# Altium schematic symbol library Aquarium_ATO_PhysicalPin_V1_1.SchLib: 21 symbols
Pins are listed as number, name and electrical type; pins without a type are passive.

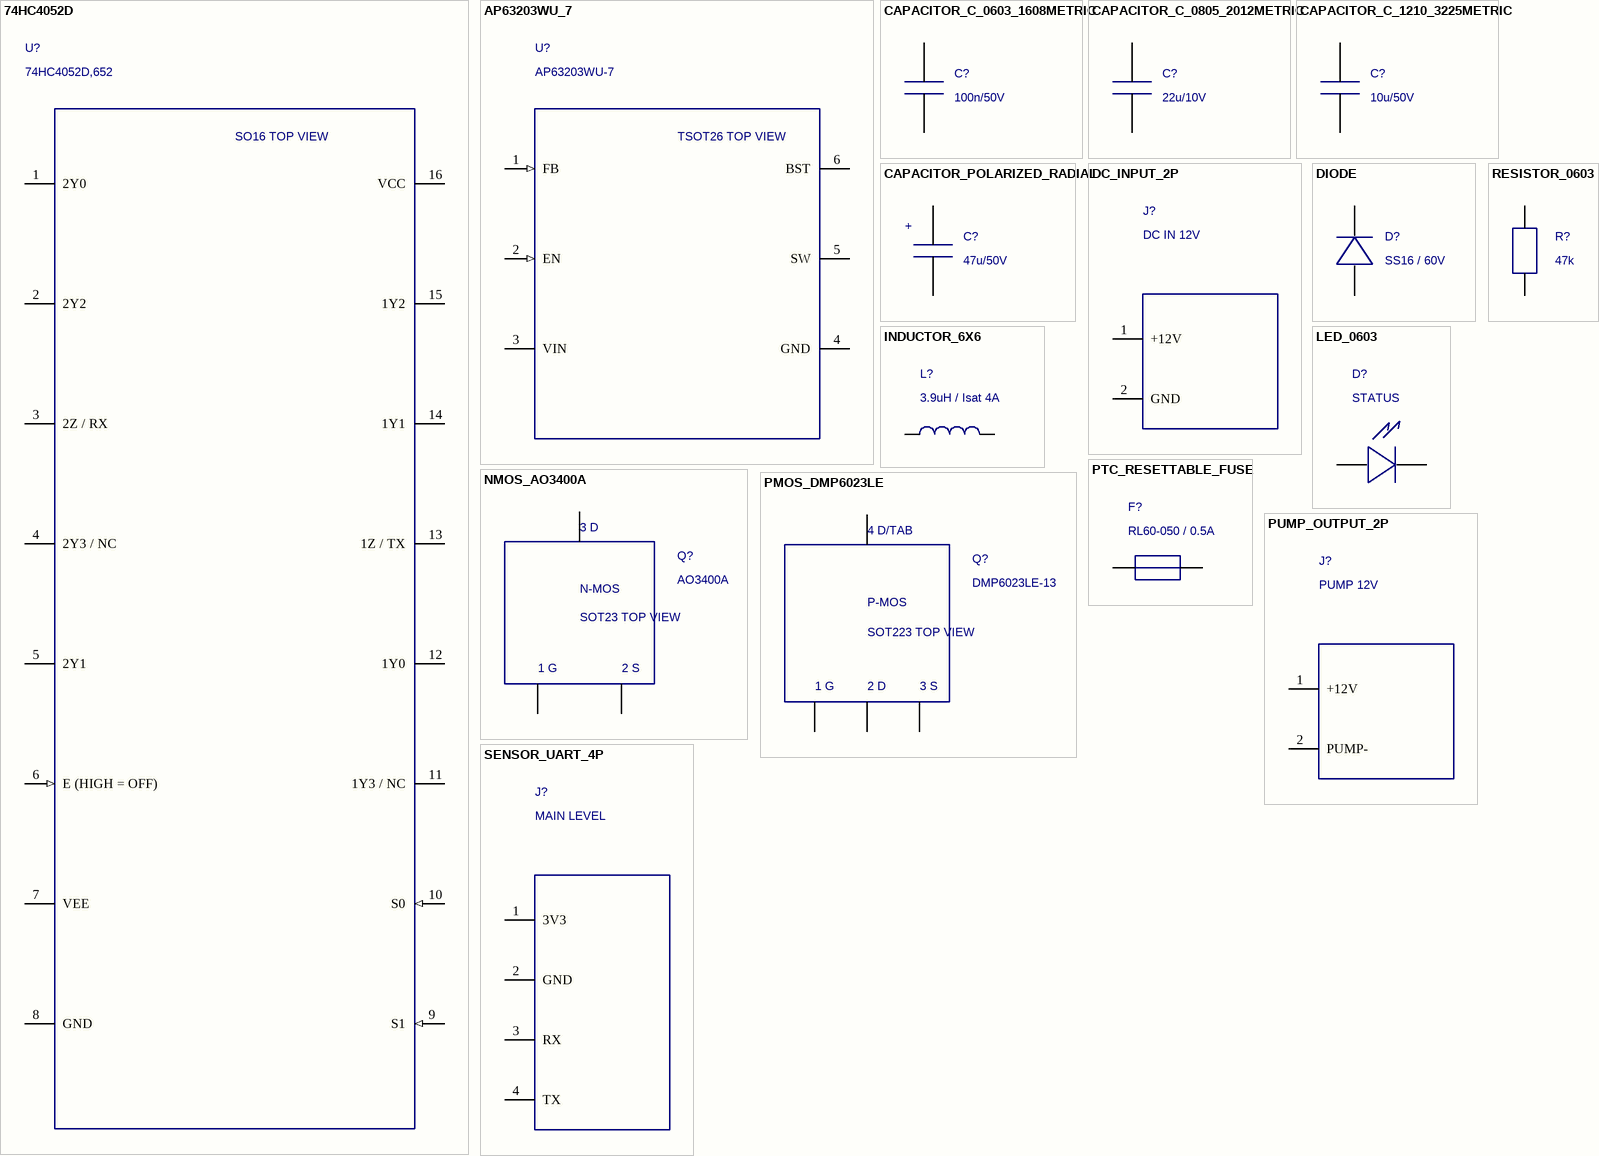
[diagram p0: symbols 74HC4052D to SENSOR_UART_4P]

## 74HC4052D
designator U?, comment 74HC4052D,652
74HC4052D,652; package SO16 (SOT109-1); footprint SOIC-16_P1.27
footprint SOIC-16_P1.27
pins: 1 2Y0, 2 2Y2, 3 2Z / RX, 4 2Y3 / NC, 5 2Y1, 6 E (HIGH = OFF) (in), 7 VEE (power), 8 GND (power), 9 S1 (in), 10 S0 (in), 11 1Y3 / NC, 12 1Y0, 13 1Z / TX, 14 1Y1, 15 1Y2, 16 VCC (power)
text: SO16 TOP VIEW

## AP63203WU_7
designator U?, comment AP63203WU-7
AP63203WU-7; package TSOT26; footprint TSOT-23-6_P0.95
footprint TSOT-23-6_P0.95
pins: 1 FB (in), 2 EN (in), 3 VIN (power), 4 GND (power), 5 SW, 6 BST
text: TSOT26 TOP VIEW

## CAPACITOR_C_0603_1608METRIC
designator C?, comment 100n/50V
100n/50V; footprint C_0603_1608Metric
footprint C_0603_1608Metric
pins: 1, 2

## CAPACITOR_C_0805_2012METRIC
designator C?, comment 22u/10V
22u/10V; footprint C_0805_2012Metric
footprint C_0805_2012Metric
pins: 1, 2

## CAPACITOR_C_1210_3225METRIC
designator C?, comment 10u/50V
10u/50V; footprint C_1210_3225Metric
footprint C_1210_3225Metric
pins: 1, 2

## CAPACITOR_POLARIZED_RADIAL
designator C?, comment 47u/50V
47u/50V; footprint CP_RADIAL_D8.0_P3.50
footprint CP_RADIAL_D8.0_P3.50
pins: 1, 2
text: +

## DC_INPUT_2P
designator J?, comment DC IN 12V
DC IN 12V; footprint TB_2P_P5.08
footprint TB_2P_P5.08
pins: 1 +12V, 2 GND

## DIODE
designator D?, comment SS16 / 60V
SS16 / 60V; package SMA; footprint D_SMA
footprint D_SMA
pins: 1 K, 2 A

## INDUCTOR_6X6
designator L?, comment 3.9uH / Isat 4A
3.9uH / Isat 4A; footprint IND_SMD_6.0x6.0
footprint IND_SMD_6.0x6.0
pins: 1, 2

## LED_0603
designator D?, comment STATUS
STATUS; footprint LED_0603_1608Metric
footprint LED_0603_1608Metric
pins: 1 K, 2 A

## NMOS_AO3400A
designator Q?, comment AO3400A
AO3400A; package SOT23; footprint SOT-23-3
footprint SOT-23-3
pins: 1 G, 2 S, 3 D
text: 3 D; N-MOS; SOT23 TOP VIEW; 1 G; 2 S

## PMOS_DMP6023LE
designator Q?, comment DMP6023LE-13
DMP6023LE-13; package SOT223 (tab/pad 4 = drain); footprint SOT-223-4
footprint SOT-223-4
pins: 1 G, 2 D, 3 S, 4 D / TAB
text: 4 D/TAB; P-MOS; SOT223 TOP VIEW; 1 G; 2 D; 3 S

## PTC_RESETTABLE_FUSE
designator F?, comment RL60-050 / 0.5A
RL60-050 / 0.5A; package Radial leaded PPTC; footprint PPTC_RADIAL_P5.10_D8.0
footprint PPTC_RADIAL_P5.10_D8.0
pins: 1, 2

## PUMP_OUTPUT_2P
designator J?, comment PUMP 12V
PUMP 12V; footprint TB_2P_P5.08
footprint TB_2P_P5.08
pins: 1 +12V, 2 PUMP-

## RESISTOR_0603
designator R?, comment 47k
47k; footprint R_0603_1608Metric
footprint R_0603_1608Metric
pins: 1, 2

## SENSOR_UART_4P
designator J?, comment MAIN LEVEL
MAIN LEVEL; footprint HDR_1x4_P2.54
footprint HDR_1x4_P2.54
pins: 1 3V3, 2 GND, 3 RX, 4 TX

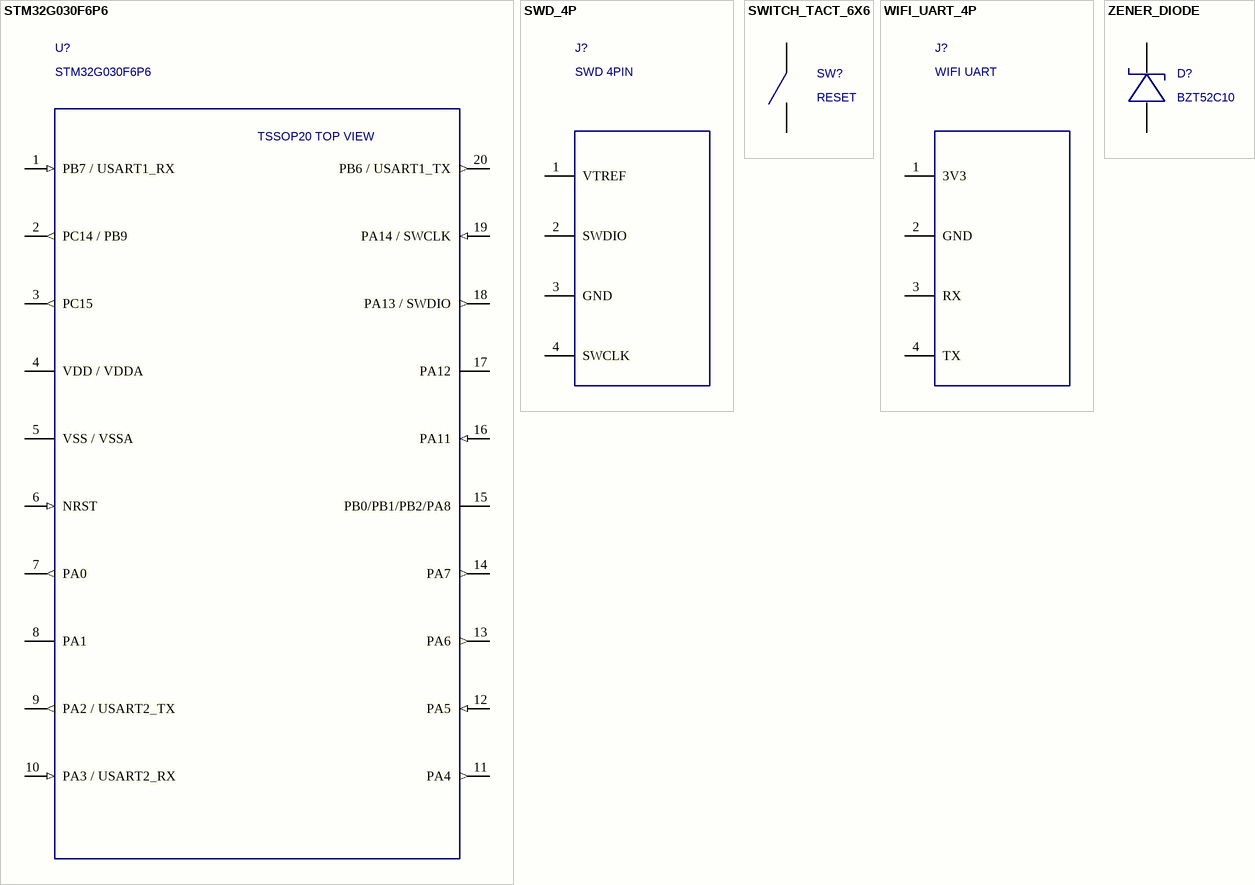
[diagram p1: symbols STM32G030F6P6 to ZENER_DIODE]

## STM32G030F6P6
designator U?
STM32G030F6P6; package TSSOP20; footprint TSSOP-20_P0.65
footprint TSSOP-20_P0.65
pins: 1 PB7 / USART1_RX (in), 2 PC14 / PB9 (out), 3 PC15 (out), 4 VDD / VDDA (power), 5 VSS / VSSA (power), 6 NRST (in), 7 PA0 (out), 8 PA1, 9 PA2 / USART2_TX (out), 10 PA3 / USART2_RX (in), 11 PA4 (out), 12 PA5 (in), 13 PA6 (out), 14 PA7 (out), 15 PB0/PB1/PB2/PA8, 16 PA11 (in), 17 PA12, 18 PA13 / SWDIO (out), 19 PA14 / SWCLK (in), 20 PB6 / USART1_TX (out)
text: TSSOP20 TOP VIEW

## SWD_4P
designator J?, comment SWD 4PIN
SWD 4PIN; footprint HDR_1x4_P2.54
footprint HDR_1x4_P2.54
pins: 1 VTREF, 2 SWDIO, 3 GND, 4 SWCLK

## SWITCH_TACT_6X6
designator SW?, comment RESET
RESET; footprint SW_TACT_6x6_4P
footprint SW_TACT_6x6_4P
pins: 1, 2

## WIFI_UART_4P
designator J?, comment WIFI UART
WIFI UART; footprint HDR_1x4_P2.54
footprint HDR_1x4_P2.54
pins: 1 3V3, 2 GND, 3 RX, 4 TX

## ZENER_DIODE
designator D?, comment BZT52C10
BZT52C10; package SOD-123; footprint SOD-123
footprint SOD-123
pins: 1 K, 2 A